# Altium schematic symbol library Resistor.SchLib: 1085 symbols (part 2 of 29)
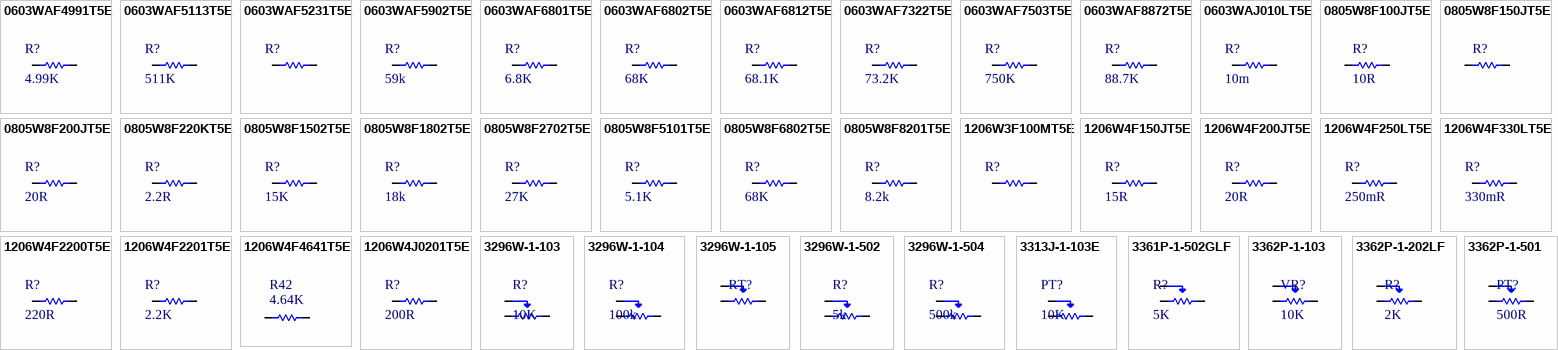
[diagram p28: symbols 0603WAF4991T5E to 3362P-1-501]

## 3296W-1-104
designator R?, comment 100k
Trimmer, Cermet, Rest 100 Kilohms, PCB, 25 Turns, Pwr-Rtg 0.5W, 3296 Series; Manufacturer: BOCHEN(Chengdu Guosheng Tech); Manufacturer Part Number: 3296W-1-104; Item Type: Potentiometer; LCSC Part Number: C330435; Value: 100k; ComponentLink1Description: LCSC; ComponentLink1URL: https://www.lcsc.com/product-detail/Variable-Resistors-Potentiometers_BOCHEN-Chengdu-Guosheng-Tech-3296W-1-104_C330435.html
footprint 3296W_
pins: 1 CCW, 2 Wiper, 3 CW

## 3296W-1-105
designator RT?
±10% 1MΩ Plugin Variable Resistors/Potentiometers ROHS; Manufacturer: BOCHEN; Manufacturer Part Number: 3296W-1-105; Package: Plugin; LCSC Part Number: C118944; Item Type: Potentiometers; ComponentLink1Description: LCSC; ComponentLink1URL: https://www.lcsc.com/product-detail/Variable-Resistors-Potentiometers_BOCHEN-Chengdu-Guosheng-Tech-3296W-1-105_C118944.html
footprint 3296W-1-105
pins: 1 CCW, 2 Wiper, 3 CW

## 3296W-1-502
designator R?, comment 5k
10% 5kΩ Plugin Potentiometers, Variable Resistors ROHS; Manufacturer: BOCHEN; Manufacturer Part Number: 3296W-1-502; LCSC Part Number: C118907; Item Type: Potentiometer; ComponentLink1Description: LCSC; ComponentLink1URL: https://www.lcsc.com/product-detail/Potentiometers-Variable-Resistors_BOCHEN-Chengdu-Guosheng-Tech-3296W-1-502_C118907.html
footprint 3296W-1-502
pins: 1 CCW, 2 Wiper, 3 CW

## 3296W-1-504
designator R?, comment 500k
Res Cermet Trimmer 500K Ohm 10% 1/2W 25(Elec)Turn; Manufacturer: BOCHEN(Chengdu Guosheng Tech); Manufacturer Part Number: 3296W-1-504; Item Type: Potentiometer; LCSC Part Number: C330437; ComponentLink1Description: LCSC; ComponentLink1URL: https://www.lcsc.com/product-detail/Variable-Resistors-Potentiometers_BOCHEN-Chengdu-Guosheng-Tech-3296W-1-504_C330437.html; Value: 500k
footprint 3296W_
pins: 1 CCW, 2 Wiper, 3 CW

## 3313J-1-103E
designator PT?, comment 10K
TRIMMER 10KOHM 0.125W J LEAD TOP; Manufacturer: Bourns; Manufacturer Part Number: 3313J-1-103E; Value: 10kR; Tolerance: 20%; Power Rating: 125mW; Number of Turns: 1; Temperature Coefficient: 100ppm/°C; Insulation Resistance: 100MR; Voltage Rating (DC): 500V; Item Type: Potentiometer; Supplier 1: Digi-Key; RoHS: Yes; Category: Variable Resistors and Potentiometers; Stock 1: 15653; Pricing 1: 1=1.83, 10=1.611, 25=1.4444, 50=1.3888, 100=1.3332, 250=1.27764, 500=1.05544 (USD); Mounting Technology: Surface Mount; Weight: 283mg; Color: Natural; Min Operating Temperature: -55°C; Max Operating Temperature: 125°C; Resistor Type: Cermet; Package Quantity: 1000; Packaging: Tape and Reel; Termination: J-Hook; Taper: Linear; Max Power Dissipation: 125mW; Type: Potentiometer; Series: Trimpot® 3313 - Sealed; Resistance Tolerance: 20%; Technology: CERMET; Length: 3.2mm; Width: 3.2mm; Height: 2.2mm; Depth: 3.5mm; Radiation Hardening: No; Reach SVHC Compliant: No; Military Standard: Not; Lead Free: Lead Free; RoHS Compliant: Yes; ComponentLink1URL: https://datasheet.ciiva.com/6197/1719390-6197392.pdf?src-supplier=Farnell; ComponentLink1Description: https://datasheet.ciiva.com/6197/1719390-6197392.pdf?src-supplier=Farnell; ComponentLink2URL: https://datasheet.ciiva.com/11831/0900766b80dbb89c-11831555.pdf?src-supplier=Rs; ComponentLink2Description: https://datasheet.ciiva.com/11831/0900766b80dbb89c-11831555.pdf?src-supplier=Rs; ComponentLink3URL: https://datasheet.ciiva.com/43573/1157501-43573718.pdf?src-supplier=Jameco; ComponentLink3Description: https://datasheet.ciiva.com/43573/1157501-43573718.pdf?src-supplier=Jameco; ComponentLink4URL: https://datasheet.ciiva.com/7953/1864507-7953225.pdf?src-supplier=Element14; ComponentLink4Description: https://datasheet.ciiva.com/7953/1864507-7953225.pdf?src-supplier=Element14; ComponentLink5URL: https://datasheet.ciiva.com/28659/1770668-28659191.pdf?src-supplier=Element14; ComponentLink5Description: https://datasheet.ciiva.com/28659/1770668-28659191.pdf?src-supplier=Element14; ComponentLink6URL: https://datasheet.ciiva.com/2156/3313-2156355.pdf?src-supplier=Digi-Key; ComponentLink6Description: https://datasheet.ciiva.com/2156/3313-2156355.pdf?src-supplier=Digi-Key; ComponentLink7URL: https://datasheet.ciiva.com/2156/3313-2156356.pdf?src-supplier=Digi-Key; ComponentLink7Description: https://datasheet.ciiva.com/2156/3313-2156356.pdf?src-supplier=Digi-Key; ComponentLink8URL: https://datasheet.ciiva.com/2156/3313-2156354.pdf?src-supplier=Digi-Key; ComponentLink8Description: https://datasheet.ciiva.com/2156/3313-2156354.pdf?src-supplier=Digi-Key; ComponentLink9URL: https://datasheet.ciiva.com/16715/70153423-16715693.pdf?src-supplier=Allied+Electronics; ComponentLink9Description: https://datasheet.ciiva.com/16715/70153423-16715693.pdf?src-supplier=Allied+Electronics; Supplier Part Number 1: 3313J-103ECT-ND; LCSC Part Number: C124616
footprint 3313J-1-103E
pins: 1 CCW, 2 Wiper, 3 CW

## 3361P-1-502GLF
designator R?, comment 5K
Resistor Cermet Trimmer 5K Ohm 10% 1/2W 1(Elec)/1(Mech)Turn 2.77mm Gull Wing SMD Embossed T/R; Manufacturer: Bourns; Manufacturer Part Number: 3361P-1-502GLF; Value: 5kR; Power Rating: 500mW; Voltage Rating: 300V; Number of Turns: 1; Temperature Coefficient: 100ppm/°C; Supplier: Digikey; Supplier Part Number: 3361P-502GLFCT-ND; RoHS: Yes; Category: Variable Resistors and Potentiometers; Stock: 12713; Pricing: 1=1.27, 10=1.121, 25=1.0088, 50=0.9716, 100=0.9342, 250=0.8782 (USD); Mounting Technology: Surface Mount; Weight: 0.567g; Min Operating Temperature: -55°C; Max Operating Temperature: 125°C; Tolerance: 10%; Resistor Type: Cermet; Packaging: Tape and Reel; Package Quantity: 1; Taper: Linear; Termination: Gull Wing; Max Power Dissipation: 500mW; Series: Trimpot® 3361 - Sealed; Resistance Tolerance: 10%; Technology: CERMET; Voltage Rating (DC): 300V; Length: 6.71mm; Width: 0.264inch; Height: 0.192inch; Depth: 8.53mm; Radiation Hardening: No; Reach SVHC Compliant: No; Military Standard: Not; RoHS Compliant: Yes; ComponentLink1URL: https://datasheet.ciiva.com/6197/1443095-6197504.pdf?src-supplier=Farnell; ComponentLink1Description: https://datasheet.ciiva.com/6197/1443095-6197504.pdf?src-supplier=Farnell; ComponentLink2URL: https://datasheet.ciiva.com/27056/2033666-27056369.pdf?src-supplier=Jameco; ComponentLink2Description: https://datasheet.ciiva.com/27056/2033666-27056369.pdf?src-supplier=Jameco; ComponentLink3URL: https://datasheet.ciiva.com/11833/0900766b80fe1d0c-11833209.pdf?src-supplier=Rs; ComponentLink3Description: https://datasheet.ciiva.com/11833/0900766b80fe1d0c-11833209.pdf?src-supplier=Rs; ComponentLink4URL: https://datasheet.ciiva.com/1477/1846252-1477777.pdf?src-supplier=Element14; ComponentLink4Description: https://datasheet.ciiva.com/1477/1846252-1477777.pdf?src-supplier=Element14; ComponentLink5URL: https://datasheet.ciiva.com/1477/1846252-1477776.pdf?src-supplier=Element14; ComponentLink5Description: https://datasheet.ciiva.com/1477/1846252-1477776.pdf?src-supplier=Element14; ComponentLink6URL: https://datasheet.ciiva.com/28666/1733537-28666333.pdf?src-supplier=Element14; ComponentLink6Description: https://datasheet.ciiva.com/28666/1733537-28666333.pdf?src-supplier=Element14; ComponentLink7URL: https://datasheet.ciiva.com/3266/3361-3266693.pdf?src-supplier=Avnet; ComponentLink7Description: https://datasheet.ciiva.com/3266/3361-3266693.pdf?src-supplier=Avnet; ComponentLink8URL: https://datasheet.ciiva.com/2156/3361-2156181.pdf?src-supplier=Digikey; ComponentLink8Description: https://datasheet.ciiva.com/2156/3361-2156181.pdf?src-supplier=Digikey; ComponentLink9URL: https://datasheet.ciiva.com/2156/3361-2156179.pdf?src-supplier=Digikey; ComponentLink9Description: https://datasheet.ciiva.com/2156/3361-2156179.pdf?src-supplier=Digikey; ComponentLink10URL: https://datasheet.ciiva.com/15225/getdatasheetpartid-162034-15225196.pdf?src-supplier=Verical; ComponentLink10Description: https://datasheet.ciiva.com/15225/getdatasheetpartid-162034-15225196.pdf?src-supplier=Verical; ComponentLink11URL: https://datasheet.ciiva.com/3266/3361-3266694.pdf?src-supplier=Avnet; ComponentLink11Description: https://datasheet.ciiva.com/3266/3361-3266694.pdf?src-supplier=Avnet; ComponentLink12URL: https://datasheet.ciiva.com/2156/3361-2156180.pdf?src-supplier=Digikey; ComponentLink12Description: https://datasheet.ciiva.com/2156/3361-2156180.pdf?src-supplier=Digikey; ComponentLink13URL: https://datasheet.ciiva.com/16716/70153632-16716878.pdf?src-supplier=Allied+Electronics; ComponentLink13Description: https://datasheet.ciiva.com/16716/70153632-16716878.pdf?src-supplier=Allied+Electronics
footprint 3361P-1-502GLF
pins: 1 CCW, 2 Wiper, 3 CW

## 3362P-1-103
designator VR?, comment 10K
TRIMMER 10K OHM 0.5W PC PIN TOP; Manufacturer: Bourns; Manufacturer Part Number: 3362P-1-103; Item Type: Potentiometer; Supplier: Mouser; LCSC Part Number: C118956; RoHS: No; Stock: 1436; Pricing: 1=1.97, 10=1.44, 50=1.44, 100=1.13, 1000=0.756, 10000=0.756 (USD); ComponentLink1URL: https://datasheet.ciiva.com/19466/1931499-19466806.pdf?src-supplier=Jameco; ComponentLink1Description: https://datasheet.ciiva.com/19466/1931499-19466806.pdf?src-supplier=Jameco; ComponentLink2URL: https://datasheet.ciiva.com/3266/3362-3266710.pdf?src-supplier=Avnet; ComponentLink2Description: https://datasheet.ciiva.com/3266/3362-3266710.pdf?src-supplier=Avnet; ComponentLink3URL: https://datasheet.ciiva.com/2161/3362-2161230.pdf?src-supplier=Digikey; ComponentLink3Description: https://datasheet.ciiva.com/2161/3362-2161230.pdf?src-supplier=Digikey
footprint 3362P-1-103
pins: 1 CCW, 2 Wiper, 3 CW

## 3362P-1-202LF
designator R?, comment 2K
TRIMMER 2K OHM 0.5W PC PIN TOP; Manufacturer: Bourns; Manufacturer Part Number: 3362P-1-202LF; Item Type: Potentiometer; Voltage Rating (AC): 300V; Tolerance: 10%; Value: 2kR; Power Rating: 500mW; Number of Turns: 1; Temperature Coefficient: 100ppm/°C; Supplier: Avnet; LCSC Part Number: C111654; RoHS: Yes; Stock: 2000; Pricing: 250=0.426, 260=0.417, 510=0.408, 1300=0.399, 2500=0.39, 13000=0.381, 25000=0.375 (USD); Mounting Technology: Through Hole,PCB; Color: 48Colour; Weight: 0.02oz; Min Operating Temperature: -55°C; Max Operating Temperature: 125°C; Voltage Rating: 300V; Packaging: Rail/Tube; Package Quantity: 50; Resistor Type: Cermet; Termination: Pin; Taper: Linear; Max Power Dissipation: 500mW; Series: Trimpot® 3362 - Sealed; Resistance Tolerance: 10%; Technology: CERMET; Length: 0.275inch; Width: 0.26inch; Height: 0.185inch; Depth: 6.99mm; Radiation Hardening: No; Lead Free: Lead Free; Reach SVHC Compliant: No; Military Standard: Not; RoHS Compliant: Yes; ComponentLink1URL: https://datasheet.ciiva.com/3890/41630408s7049825n1506-3890012.pdf?src-supplier=Arrow+Electronics; ComponentLink1Description: https://datasheet.ciiva.com/3890/41630408s7049825n1506-3890012.pdf?src-supplier=Arrow+Electronics; ComponentLink2URL: https://datasheet.ciiva.com/19482/1967467-19482206.pdf?src-supplier=Jameco; ComponentLink2Description: https://datasheet.ciiva.com/19482/1967467-19482206.pdf?src-supplier=Jameco; ComponentLink3URL: https://datasheet.ciiva.com/11830/0900766b8069ccf8-11830890.pdf?src-supplier=Rs; ComponentLink3Description: https://datasheet.ciiva.com/11830/0900766b8069ccf8-11830890.pdf?src-supplier=Rs; ComponentLink4URL: https://datasheet.ciiva.com/29122/447334-da-01-en-trimmer-tht3362p-1-202lf-2k-0-5w-29122266.pdf?src-supplier=Conrad; ComponentLink4Description: https://datasheet.ciiva.com/29122/447334-da-01-en-trimmer-tht3362p-1-202lf-2k-0-5w-29122266.pdf?src-supplier=Conrad; ComponentLink5URL: https://datasheet.ciiva.com/14108/mk3362-dat-e-14108841.pdf?src-supplier=Distrelec; ComponentLink5Description: https://datasheet.ciiva.com/14108/mk3362-dat-e-14108841.pdf?src-supplier=Distrelec; ComponentLink6URL: https://datasheet.ciiva.com/3266/3362-3266301.pdf?src-supplier=Avnet; ComponentLink6Description: https://datasheet.ciiva.com/3266/3362-3266301.pdf?src-supplier=Avnet; ComponentLink7URL: https://datasheet.ciiva.com/2156/3362-2156399.pdf?src-supplier=Digikey; ComponentLink7Description: https://datasheet.ciiva.com/2156/3362-2156399.pdf?src-supplier=Digikey; ComponentLink8URL: https://datasheet.ciiva.com/30125/3362-30125853.pdf?src-supplier=Onlinecomponents.com; ComponentLink8Description: https://datasheet.ciiva.com/30125/3362-30125853.pdf?src-supplier=Onlinecomponents.com; ComponentLink9URL: https://datasheet.ciiva.com/16715/70153603-16715070.pdf?src-supplier=Allied+Electronics; ComponentLink9Description: https://datasheet.ciiva.com/16715/70153603-16715070.pdf?src-supplier=Allied+Electronics; ComponentLink10URL: https://datasheet.ciiva.com/7953/1815116-7953048.pdf?src-supplier=Element14; ComponentLink10Description: https://datasheet.ciiva.com/7953/1815116-7953048.pdf?src-supplier=Element14
footprint 3362P-1-202LF
pins: 1 CCW, 2 Wiper, 3 CW

## 3362P-1-501
designator PT?, comment 500R
±10% 500Ω Plugin Variable Resistors/Potentiometers ROHS; Manufacturer: BOCHEN; Manufacturer Part Number: 3362P-1-501; Package: Plugin; LCSC Part Number: C118916; Item Type: Potentiometers; ComponentLink1Description: LCSC; ComponentLink1URL: https://www.lcsc.com/product-detail/Variable-Resistors-Potentiometers_BOCHEN-Chengdu-Guosheng-Tech-3362P-1-501_C118916.html
footprint 3362P-1-501
pins: 1 CCW, 2 Wiper, 3 CW

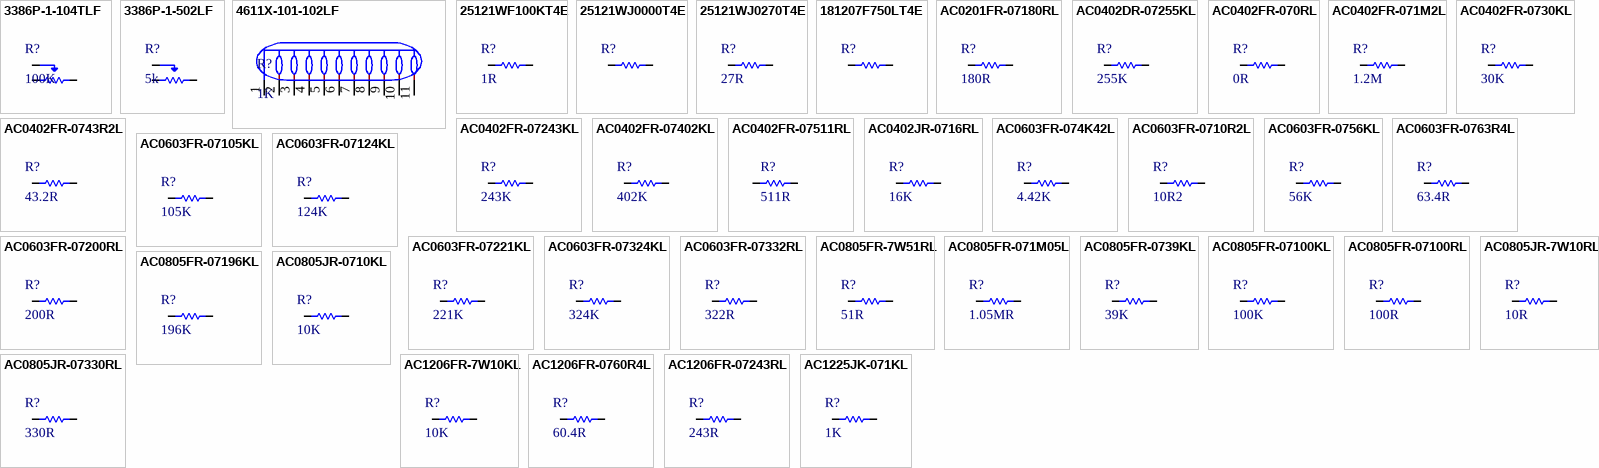
[diagram p3: symbols 3386P-1-104TLF to AC1225JK-071KL]

## 3386P-1-104TLF
designator R?, comment 100K
SMD Chip Resistor, 68 kOhm, ï¿½ 1%, 62.5 mW, 0402 [1005 Metric], Thick Film, General Purpose; Manufacturer: BOURNS; Manufacturer Part Number: 3386P-1-104TLF; Item Type: Potentiometer; Voltage Rating (AC): 300V; Power Rating: 63mW; Temperature Coefficient: 100ppm/°C; Voltage Rating: 50V; LCSC Part Number: C116303; ComponentLink1Description: LCSC; ComponentLink1URL: https://www.lcsc.com/product-detail/Potentiometers-Variable-Resistors_BOURNS-3386P-1-104TLF_C116303.html?s_z=n_%203386P-1-104; Value: 100K; Supplier: Digikey; Supplier Part Number: 3386P-502LF-ND; RoHS: Yes; Category: Variable Resistors and Potentiometers; Stock: 3184; Pricing: 1=1.61, 10=1.424, 25=1.2816, 50=1.2342, 100=1.1868, 250=1.11556, 500=0.9494, 1000=0.8782, 5000=0.72154 (USD); Case/Package: 0402; Case Code (Metric): 1005; Case Code (Imperial): 0402; Min Operating Temperature: -55°C; Max Operating Temperature: 155°C; Tolerance: 1%; Series: RC; Package Quantity: 1; Packaging: Tape and Reel; Resistor Type: Thick Film; Number of Terminations: 2; Termination: SMD/SMT; Max Power Dissipation: 63mW; Features: Moisture Resistant; Construction: Rectangular; Resistance Tolerance: 1%; Length: 0.039inch; Width: 0.02inch; Height: 0.016inch; Depth: 0.5mm; RoHS Compliant: Yes; Military Standard: Not; Reach SVHC Compliant: Unknown; Lead Free: 5697LeadFree; ComponentLink2URL: https://datasheet.ciiva.com/2553/pyu-r-int-thick-7-2553216.pdf?src-supplier=Digikey; ComponentLink2Description: https://datasheet.ciiva.com/2553/pyu-r-int-thick-7-2553216.pdf?src-supplier=Digikey; ComponentLink3URL: https://datasheet.ciiva.com/2553/pyu-r-int-thick-7-2553217.pdf?src-supplier=Digikey; ComponentLink3Description: https://datasheet.ciiva.com/2553/pyu-r-int-thick-7-2553217.pdf?src-supplier=Digikey; ComponentLink4URL: https://datasheet.ciiva.com/2553/pyu-r-int-thick-7-2553215.pdf?src-supplier=Digikey; ComponentLink4Description: https://datasheet.ciiva.com/2553/pyu-r-int-thick-7-2553215.pdf?src-supplier=Digikey; ComponentLink5URL: https://datasheet.ciiva.com/7850/1018594-7850072.pdf?src-supplier=Element14; ComponentLink5Description: https://datasheet.ciiva.com/7850/1018594-7850072.pdf?src-supplier=Element14; ComponentLink6URL: https://datasheet.ciiva.com/7850/1018594-7850073.pdf?src-supplier=Element14; ComponentLink6Description: https://datasheet.ciiva.com/7850/1018594-7850073.pdf?src-supplier=Element14; ComponentLink7URL: https://datasheet.ciiva.com/16781/pyu-rc0402-51-rohs-l-6-r-16781001.pdf?src-supplier=Future+Electronics; ComponentLink7Description: https://datasheet.ciiva.com/16781/pyu-rc0402-51-rohs-l-6-r-16781001.pdf?src-supplier=Future+Electronics
footprint 3386P-1-104TLF
pins: 1 CCW, 2 Wiper, 3 CW

## 3386P-1-502LF
designator R?, comment 5k
Cermet Not Linear VERTICAL Trimmer Potentiometer 卤10% 280deg 500mW 85C; Manufacturer: BOURNS; Manufacturer Part Number: 3386P-1-502LF; Voltage Rating (AC): 300V; LCSC Part Number: C116296; Item Type: Potentiometer; ComponentLink1Description: LCSC; ComponentLink1URL: https://www.lcsc.com/product-detail/Variable-Resistors-Potentiometers_BOURNS-3386P-1-502LF_C116296.html; Value: 5K; Supplier: Digikey; Supplier Part Number: 3386P-502LF-ND; RoHS: Yes; Category: Variable Resistors and Potentiometers; Stock: 3184; Pricing: 1=1.61, 10=1.424, 25=1.2816, 50=1.2342, 100=1.1868, 250=1.11556, 500=0.9494, 1000=0.8782, 5000=0.72154 (USD); ComponentLink2URL: https://datasheet.ciiva.com/27051/1158379-27051564.pdf?src-supplier=Jameco; ComponentLink2Description: https://datasheet.ciiva.com/27051/1158379-27051564.pdf?src-supplier=Jameco; ComponentLink3URL: https://datasheet.ciiva.com/11831/0900766b8069ccf9-11831043.pdf?src-supplier=Rs; ComponentLink3Description: https://datasheet.ciiva.com/11831/0900766b8069ccf9-11831043.pdf?src-supplier=Rs; ComponentLink4URL: https://datasheet.ciiva.com/29122/447392-da-01-en-trimmer-tht3386p-1-502lf-5k-0-5w-29122217.pdf?src-supplier=Conrad; ComponentLink4Description: https://datasheet.ciiva.com/29122/447392-da-01-en-trimmer-tht3386p-1-502lf-5k-0-5w-29122217.pdf?src-supplier=Conrad; ComponentLink5URL: https://datasheet.ciiva.com/2156/3386-2156421.pdf?src-supplier=Digikey; ComponentLink5Description: https://datasheet.ciiva.com/2156/3386-2156421.pdf?src-supplier=Digikey; ComponentLink6URL: https://datasheet.ciiva.com/14108/sa3386-dat-e-14108981.pdf?src-supplier=Distrelec; ComponentLink6Description: https://datasheet.ciiva.com/14108/sa3386-dat-e-14108981.pdf?src-supplier=Distrelec; ComponentLink7URL: https://datasheet.ciiva.com/5005/3386-21463-5005193.pdf?src-supplier=Mouser; ComponentLink7Description: https://datasheet.ciiva.com/5005/3386-21463-5005193.pdf?src-supplier=Mouser; ComponentLink8URL: https://datasheet.ciiva.com/7953/1815119-7953130.pdf?src-supplier=Element14; ComponentLink8Description: https://datasheet.ciiva.com/7953/1815119-7953130.pdf?src-supplier=Element14; ComponentLink9URL: https://datasheet.ciiva.com/16714/70153604-16714749.pdf?src-supplier=Allied+Electronics; ComponentLink9Description: https://datasheet.ciiva.com/16714/70153604-16714749.pdf?src-supplier=Allied+Electronics
footprint 3386P-1-502LF
pins: 1 CCW, 2 Wiper, 3 CW

## 4611X-101-102LF
designator R?, comment 1K
RES ARRAY 10 RES 1K OHM 11SIP; Manufacturer: Bourns; Manufacturer Part Number: 4611X-101-102LF; Item Type: Resistor Arrays; Circuit Type: Bussed; Lead Length: 3.3mm; Number of Circuits: 1; Number of Elements: 10; Power Dissipation: 1.38W; Power Per Element: 200mW; Value: 1kΩ; Temperature Coefficient: 100ppm/°C; Tolerance: 2%; Voltage Rating: 100V; Supplier: DigiKey; LCSC Part Number: C1357914; RoHS: Compliant; Stock: 900; Pricing: 1=0.54, 10=0.346, 25=0.294, 50=0.2614, 100=0.2335, 250=0.20288, 500=0.18372, 1000=0.16743, 5000=0.13843 (USD); Case/Package: SIP; China RoHS: Non-Compliant; Depth: 2.49mm; Height: 8.89mm; Lead Pitch: 2.54mm; Length: 27.8892mm; Lifecycle Status: Production; Max Operating Temperature: 125°C; Military Standard: Not; Min Operating Temperature: -55°C; Mounting Technology: Through Hole; Pins: 11; Number of Resistors: 10; Number of Terminals: 11; Packaging: Bulk; Power Rating: 1.38W; Radiation Hardening: No; REACH SVHC: Yes; Schedule B: 8533210075; Terminal Pitch: 2.54mm; Termination: Pin; Voltage Rating (DC): 100V; Width: 2.49mm; Working Voltage: 100V; ComponentLink1URL: https://datasheet.octopart.com:443/4611X-101-102LF-Bourns-datasheet-159442436.pdf?src-supplier=IHS; ComponentLink1Description: https://datasheet.octopart.com:443/4611X-101-102LF-Bourns-datasheet-159442436.pdf?src-supplier=IHS; ComponentLink2URL: https://datasheet.octopart.com:443/4611X-101-102LF-Bourns-datasheet-8636294.pdf?src-supplier=element14+APAC; ComponentLink2Description: https://datasheet.octopart.com:443/4611X-101-102LF-Bourns-datasheet-8636294.pdf?src-supplier=element14+APAC; ComponentLink3URL: http://sigma.octopart.com:80/conflict_mineral_statement/Bourns-company-36.pdf?src-supplier=Compliance+Statements; ComponentLink3Description: http://sigma.octopart.com:80/conflict_mineral_statement/Bourns-company-36.pdf?src-supplier=Compliance+Statements
footprint 4611X-101-102LF
pins: 1, 2, 3, 4, 5, 6, 7, 8, 9, 10, 11

## 25121WF100KT4E
designator R?, comment 1R
1W Thick Film Resistors ±1% ±400ppm/℃ 1Ω 2512 Chip Resistor - Surface Mount ROHS; Manufacturer: UNI-ROYAL; Manufacturer Part Number: 25121WF100KT4E; Package: 2512; LCSC Part Number: C11254; Item Type: Resistor; ComponentLink1Description: LCSC; ComponentLink1URL: https://www.lcsc.com/product-detail/Chip-Resistor-Surface-Mount_UNI-ROYAL-Uniroyal-Elec-25121WF100KT4E_C11254.html
footprint RES-2512
pins: 1, 2

## 25121WJ0000T4E
designator R?
1W Thick Film Resistor 200V ±5% ±800ppm/℃ 0Ω 2512 Chip Resistor - Surface Mount ROHS; Manufacturer: Royal Electronic Factory; Manufacturer Part Number: 25121WJ0000T4E; Value: 0R; Temperature Coefficient: 400ppm/°C; Supplier: Mouser; LCSC Part Number: C25469; RoHS: No; Item Type: Resistor; Stock: 12000; Pricing: 10000=0.019 (USD); ComponentLink1URL: https://datasheet.octopart.com/25121WJ0000T4E-Royal-Ohm-datasheet-165785611.pdf?src-supplier=TME; ComponentLink1Description: https://datasheet.octopart.com/25121WJ0000T4E-Royal-Ohm-datasheet-165785611.pdf?src-supplier=TME
footprint Res-2512
pins: 1, 2

## 25121WJ0270T4E
designator R?, comment 27R
1W Thick Film Resistors ±100ppm/℃ ±5% 27Ω 2512 Chip Resistor - Surface Mount ROHS; Manufacturer: UNI-ROYAL; Manufacturer Part Number: 25121WJ0270T4E; Package: 2512; LCSC Part Number: C25478; Item Type: Resistor; ComponentLink1Description: LCSC; ComponentLink1URL: https://www.lcsc.com/product-detail/Chip-Resistor-Surface-Mount_UNI-ROYAL-Uniroyal-Elec-25121WJ0270T4E_C25478.html
footprint RES-2512
pins: 1, 2

## 181207F750LT4E
designator R?
0.75W Thick Film Resistors 200V ±1% 750mΩ 1812 Chip Resistor - Surface Mount ROHS; Manufacturer: UNI-ROYAL(Uniroyal Elec); Manufacturer Part Number: 181207F750LT4E; Package: 1812; LCSC Part Number: C422051; Item Type: Resistor; ComponentLink1Description: LCSC; ComponentLink1URL: https://www.lcsc.com/product-detail/Chip-Resistor-Surface-Mount_UNI-ROYAL-Uniroyal-Elec-181207F750LT4E_C422051.html?s_z=n_0.75%20ohm
footprint Res 1812
pins: 1, 2

## AC0201FR-07180RL
designator R?, comment 180R
RES SMD 180 OHM 1% 1/20W 0201; Manufacturer: Yageo; Manufacturer Part Number: AC0201FR-07180RL; Max Power Dissipation: 50mW; Temperature Coefficient: 200ppm/°C; Item Type: Resistor; Supplier: Digi-Key; Supplier Part Number: YAG5164CT-ND; RoHS: Yes; Category: Chip SMD Resistors; Stock: 11641; Pricing: 1=0.1, 10=0.037, 50=0.024, 100=0.0203, 500=0.01412, 1000=0.0123, 5000=0.00915 (USD); Case/Package: 0201; Min Operating Temperature: -55°C; Max Operating Temperature: 155°C; Packaging: Tape and Reel; Value: 180R; Number of Terminations: 2; Tolerance: 1%; Features: Moisture Resistant,Automotive AEC-Q200; Series: AC; Length: 0.024inch; Width: 0.012inch; Height: 0.01inch; RoHS Compliant: Yes; ComponentLink1URL: http://www.yageo.com/NewPortal/yageodocoutput?fileName=/pdf/R-Chip/PYu-AC_51_RoHS_L_5.pdf&src-supplier=Digi-Key; ComponentLink1Description: http://www.yageo.com/NewPortal/yageodocoutput?fileName=/pdf/R-Chip/PYu-AC_51_RoHS_L_5.pdf&src-supplier=Digi-Key; ComponentLink2URL: http://www.yageo.com/NewPortal/yageodocoutput?fileName=/pdf/R-Chip/PYu-AC_51_RoHS_L_6.pdf&src-supplier=Digi-Key; ComponentLink2Description: http://www.yageo.com/NewPortal/yageodocoutput?fileName=/pdf/R-Chip/PYu-AC_51_RoHS_L_6.pdf&src-supplier=Digi-Key; LCSC Part Number: C226435
footprint Res-0201
pins: 1, 2

## AC0402DR-07255KL
designator R?, comment 255K
RES 255K OHM 0.5% 1/16W 0402; Manufacturer: Yageo; Manufacturer Part Number: AC0402DR-07255KL; Item Type: Resistors; Supplier: Mouser; LCSC Part Number: C226702; RoHS: Yes; Pricing: 1=0.1, 10=0.047, 50=0.047, 100=0.036, 1000=0.027, 10000=0.015 (USD); RoHS Compliant: Yes
footprint Res-0402
pins: 1, 2

## AC0402FR-070RL
designator R?, comment 0R
RESISTOR 0402 JUMPER ZERO OHM; Manufacturer: Yageo; Manufacturer Part Number: AC0402FR-070RL; Voltage Rating: 50V; Power Rating: 62.5mW; Tolerance: 1%; Temperature Coefficient: 200ppm/°C; Supplier: Digi-Key; Supplier Part Number: 13-AC0402FR-070RLDKR-ND; RoHS: Yes; Category: Chip SMD Resistors; Stock: 337140; Pricing: 1=0.1, 10=0.017, 25=0.0132, 50=0.01, 100=0.0071, 250=0.00568, 500=0.00454, 1000=0.00335, 5000=0.0024 (USD); Case/Package: 0402; Case Code (Imperial): 0402; Case Code (Metric): 1005; Min Operating Temperature: -55°C; Max Operating Temperature: 155°C; Value: 0R; Packaging: Tape and Reel; Termination: SMD/SMT; Series: AC; Height: 370um; ComponentLink1URL: https://datasheet.ciiva.com/12656/pyu-ac-51-rohs-l-2-12656734.pdf?src-supplier=Mouser; ComponentLink1Description: https://datasheet.ciiva.com/12656/pyu-ac-51-rohs-l-2-12656734.pdf?src-supplier=Mouser; LCSC Part Number: C226739; Item Type: Resistor; ComponentLink2Description: LCSC; ComponentLink2URL: https://www.lcsc.com/product-detail/Chip-Resistor-Surface-Mount_YAGEO-AC0402FR-070RL_C226739.html
footprint Res-0402
pins: 1, 2

## AC0402FR-071M2L
designator R?, comment 1.2M
RES SMD 1.2M OHM 1% 1/16W 0402; Manufacturer: Yageo; Manufacturer Part Number: AC0402FR-071M2L; Power Rating: 62.5mW; Value: 1.2MR; Voltage Rating: 50V; Max Power Dissipation: 63mW; Temperature Coefficient: 100ppm/°C; Item Type: Resistor; Supplier: Avnet; Supplier Part Number: AC0402FR-071M2L; RoHS: Yes; Category: Chip SMD Resistors; Stock: 1670000; Pricing: 10000=0.00115 (USD); Case/Package: 0402; Case Code (Imperial): 0402; Case Code (Metric): 1005; Min Operating Temperature: -55°C; Max Operating Temperature: 155°C; Packaging: Tape and Reel; Tolerance: 1%; Number of Terminations: 2; Termination: SMD/SMT; Features: Moisture Resistant,Automotive AEC-Q200; Series: AC; Length: 0.039inch; Width: 0.5mm; Height: 0.015inch; RoHS Compliant: Yes; ComponentLink1URL: http://www.mouser.com/ds/2/447/yageodocoutput-1111992.pdf?src-supplier=Mouser; ComponentLink1Description: http://www.mouser.com/ds/2/447/yageodocoutput-1111992.pdf?src-supplier=Mouser; ComponentLink2URL: http://www.yageo.com/NewPortal/yageodocoutput?fileName=/pdf/R-Chip/PYu-AC_51_RoHS_L_6.pdf&src-supplier=Digi-Key; ComponentLink2Description: http://www.yageo.com/NewPortal/yageodocoutput?fileName=/pdf/R-Chip/PYu-AC_51_RoHS_L_6.pdf&src-supplier=Digi-Key; LCSC Part Number: C226867
footprint Res-0402
pins: 1, 2

## AC0402FR-0730KL
designator R?, comment 30K
RES SMD 30K OHM 1% 1/16W 0402; Manufacturer: Yageo; Manufacturer Part Number: AC0402FR-0730KL; Item Type: Resistor; Power Rating: 62.5mW; Value: 30kR; Voltage Rating: 50V; Temperature Coefficient: 100ppm/°C; Max Power Dissipation: 63mW; Supplier: Future Electronics; Supplier Part Number: 2028482; RoHS: Yes; Stock: 2570000; Pricing: 10000=0.0021, 50000=0.0023, 150000=0.0019, 300000=0.0022, 500000=0.0018, 1000000=0.0021, 1500000=0.0018, 3000000=0.0019, 5000000=0.0016 (USD); Case/Package: 0402; Case Code (Imperial): 0402; Case Code (Metric): 1005; Weight: 2.3E-05oz; Min Operating Temperature: -55°C; Max Operating Temperature: 155°C; Tolerance: 1%; Packaging: Tape and Reel; Termination: SMD/SMT; Number of Terminations: 2; Features: Moisture Resistant,Automotive AEC-Q200; Series: AC; Length: 0.039inch; Width: 0.5mm; Height: 0.015inch; Lead Free: Lead Free; RoHS Compliant: Yes; ComponentLink1URL: http://www.mouser.com/ds/2/447/yageodocoutput-1111992.pdf?src-supplier=Mouser; ComponentLink1Description: http://www.mouser.com/ds/2/447/yageodocoutput-1111992.pdf?src-supplier=Mouser; ComponentLink2URL: https://datasheet.octopart.com/AC0402FR-0730KL-Yageo-datasheet-166720450.pdf?src-supplier=Future+Electronics; ComponentLink2Description: https://datasheet.octopart.com/AC0402FR-0730KL-Yageo-datasheet-166720450.pdf?src-supplier=Future+Electronics; ComponentLink3URL: http://www.yageo.com/documents/recent/PYu-AC_51_RoHS_L_2_revised.pdf?src-supplier=Future+Electronics; ComponentLink3Description: http://www.yageo.com/documents/recent/PYu-AC_51_RoHS_L_2_revised.pdf?src-supplier=Future+Electronics; ComponentLink4URL: http://www.yageo.com/NewPortal/yageodocoutput?fileName=/pdf/R-Chip/PYu-AC_51_RoHS_L_6.pdf&src-supplier=Digikey; ComponentLink4Description: http://www.yageo.com/NewPortal/yageodocoutput?fileName=/pdf/R-Chip/PYu-AC_51_RoHS_L_6.pdf&src-supplier=Digikey
footprint Res-0402
pins: 1, 2

## AC0402FR-0743R2L
designator R?, comment 43.2R
RES SMD 43.2 OHM 1% 1/16W 0402; Manufacturer: Yageo; Manufacturer Part Number: AC0402FR-0743R2L; Voltage Rating: 50V; Power Rating: 62.5mW; Temperature Coefficient: 100ppm/°C; Max Power Dissipation: 63mW; Supplier: Arrow Electronics; LCSC Part Number: C227082; RoHS: Yes; Category: Resistor; Stock: 130000; Pricing: 10000=0.0024, 20000=0.0014 (USD); Case/Package: 0402; Case Code (Imperial): 0402; Case Code (Metric): 1005; Weight: 2.3E-05oz; Min Operating Temperature: -55°C; Max Operating Temperature: 155°C; Value: 43.2R; Tolerance: 1%; Packaging: Tape and Reel; Termination: SMD/SMT; Number of Terminations: 2; Features: Moisture Resistant,Automotive AEC-Q200; Series: AC; Length: 0.039inch; Width: 0.5mm; Height: 0.015inch; RoHS Compliant: Yes; ComponentLink1URL: http://www.mouser.com/ds/2/447/yageodocoutput-1111992.pdf?src-supplier=Mouser; ComponentLink1Description: http://www.mouser.com/ds/2/447/yageodocoutput-1111992.pdf?src-supplier=Mouser; ComponentLink2URL: http://www.yageo.com/NewPortal/yageodocoutput?fileName=/pdf/R-Chip/PYu-AC_51_RoHS_L_6.pdf&src-supplier=Digikey; ComponentLink2Description: http://www.yageo.com/NewPortal/yageodocoutput?fileName=/pdf/R-Chip/PYu-AC_51_RoHS_L_6.pdf&src-supplier=Digikey
footprint Res-0402
pins: 1, 2

## AC0402FR-07243KL
designator R?, comment 243K
RES SMD 243K OHM 1% 1/16W 0402; Manufacturer: Yageo; Manufacturer Part Number: AC0402FR-07243KL; Item Type: Resistors; Value: 243kR; Max Power Dissipation: 63mW; Temperature Coefficient: 100ppm/°C; Voltage Rating: 50V; Supplier: Future Electronics; Supplier Part Number: 4132011; RoHS: Yes; Stock: 80000; Pricing: 10000=0.0017, 50000=0.0016, 300000=0.0015, 1000000=0.0014, 3000000=0.0013 (USD); Case/Package: 0402; Case Code (Imperial): 0402; Case Code (Metric): 1005; Min Operating Temperature: -55°C; Max Operating Temperature: 155°C; Packaging: Tape and Reel; Number of Terminations: 2; Tolerance: 1%; Features: Moisture Resistant,Automotive AEC-Q200; Series: AC; Length: 0.039inch; Width: 0.02inch; Height: 0.015inch; Ratings: AEC-Q200; RoHS Compliant: Yes; ComponentLink1URL: https://www.mouser.com/ds/2/447/yageodocoutput-1111992.pdf?src-supplier=Mouser; ComponentLink1Description: https://www.mouser.com/ds/2/447/yageodocoutput-1111992.pdf?src-supplier=Mouser; ComponentLink2URL: https://www.yageo.com/upload/media/product/productsearch/datasheet/rchip/PYu-AC_51_RoHS_L_7.pdf?src-supplier=Digikey; ComponentLink2Description: https://www.yageo.com/upload/media/product/productsearch/datasheet/rchip/PYu-AC_51_RoHS_L_7.pdf?src-supplier=Digikey; ComponentLink3URL: http://www.yageo.com/NewPortal/yageodocoutput?fileName=/pdf/R-Chip/PYu-AC_51_RoHS_L_6.pdf&src-supplier=Digikey; ComponentLink3Description: http://www.yageo.com/NewPortal/yageodocoutput?fileName=/pdf/R-Chip/PYu-AC_51_RoHS_L_6.pdf&src-supplier=Digikey; LCSC Part Number: C226366
footprint Res-0402
pins: 1, 2

## AC0402FR-07402KL
designator R?, comment 402K
RES SMD 402K OHM 1% 1/16W 0402; Manufacturer: Yageo; Manufacturer Part Number: AC0402FR-07402KL; Item Type: Resistors; Power Rating: 62.5mW; Value: 402kR; Voltage Rating: 50V; Temperature Coefficient: 100ppm/°C; Max Power Dissipation: 63mW; Supplier: Digikey; LCSC Part Number: C227065; RoHS: Yes; Stock: 23022; Pricing: 1=0.1, 10=0.012, 50=0.0096, 100=0.0071, 500=0.00612, 1000=0.0051, 5000=0.00408 (USD); Case/Package: 0402; Case Code (Imperial): 0402; Case Code (Metric): 1005; Min Operating Temperature: -55°C; Max Operating Temperature: 155°C; Packaging: Tape and Reel; Tolerance: 1%; Termination: SMD/SMT; Number of Terminations: 2; Features: Moisture Resistant,Automotive AEC-Q200; Series: AC; Length: 0.039inch; Width: 0.5mm; Height: 0.015inch; RoHS Compliant: Yes; ComponentLink1URL: http://www.mouser.com/ds/2/447/yageodocoutput-1111992.pdf?src-supplier=Mouser; ComponentLink1Description: http://www.mouser.com/ds/2/447/yageodocoutput-1111992.pdf?src-supplier=Mouser; ComponentLink2URL: http://www.yageo.com/NewPortal/yageodocoutput?fileName=/pdf/R-Chip/PYu-AC_51_RoHS_L_6.pdf&src-supplier=Digikey; ComponentLink2Description: http://www.yageo.com/NewPortal/yageodocoutput?fileName=/pdf/R-Chip/PYu-AC_51_RoHS_L_6.pdf&src-supplier=Digikey
footprint Res-0402
pins: 1, 2

## AC0402FR-07511RL
designator R?, comment 511R
RES SMD 511 OHM 1% 1/16W 0402; Manufacturer: Yageo; Manufacturer Part Number: AC0402FR-07511RL; Item Type: Resistor; Power Rating: 62.5mW; Voltage Rating: 50V; Temperature Coefficient: 100ppm/°C; Max Power Dissipation: 63mW; Supplier: Digikey; LCSC Part Number: C227124; RoHS: Yes; Pricing: 10000=0.00343 (USD); Case/Package: 0402; Case Code (Imperial): 0402; Case Code (Metric): 1005; Weight: 2.3E-05oz; Min Operating Temperature: -55°C; Max Operating Temperature: 155°C; Tolerance: 1%; Value: 511R; Packaging: Tape and Reel; Termination: SMD/SMT; Number of Terminations: 2; Features: Moisture Resistant,Automotive AEC-Q200; Series: AC; Length: 0.039inch; Width: 0.5mm; Height: 0.015inch; RoHS Compliant: Yes; ComponentLink1URL: http://www.mouser.com/ds/2/447/yageodocoutput-1111992.pdf?src-supplier=Mouser; ComponentLink1Description: http://www.mouser.com/ds/2/447/yageodocoutput-1111992.pdf?src-supplier=Mouser; ComponentLink2URL: http://www.yageo.com/NewPortal/yageodocoutput?fileName=/pdf/R-Chip/PYu-AC_51_RoHS_L_6.pdf&src-supplier=Digikey; ComponentLink2Description: http://www.yageo.com/NewPortal/yageodocoutput?fileName=/pdf/R-Chip/PYu-AC_51_RoHS_L_6.pdf&src-supplier=Digikey
footprint Res-0402
pins: 1, 2

## AC0402JR-0716RL
designator R?, comment 16K
RES SMD 16 OHM 5% 1/16W 0402; Manufacturer: Yageo; Manufacturer Part Number: AC0402JR-0716RL; Value: 16R; Max Power Dissipation: 63mW; Temperature Coefficient: 100ppm/°C; Voltage Rating: 50V; Item Type: Resistor; Supplier: Digikey; Supplier Part Number: AC0402JR-0716RL-ND; RoHS: Yes; Category: Chip SMD Resistors; Pricing: 10000=0.00299 (USD); Case/Package: 0402; Min Operating Temperature: -55°C; Max Operating Temperature: 155°C; Packaging: Tape and Reel; Number of Terminations: 2; Tolerance: 5%; Features: Moisture Resistant,Automotive AEC-Q200; Series: AC; Length: 0.039inch; Width: 0.02inch; Height: 0.015inch; RoHS Compliant: Yes; ComponentLink1URL: http://www.yageo.com/NewPortal/yageodocoutput?fileName=/pdf/R-Chip/PYu-AC_51_RoHS_L_6.pdf&src-supplier=Digikey; ComponentLink1Description: http://www.yageo.com/NewPortal/yageodocoutput?fileName=/pdf/R-Chip/PYu-AC_51_RoHS_L_6.pdf&src-supplier=Digikey; LCSC Part Number: C227309
footprint Res-0402
pins: 1, 2

## AC0603FR-074K42L
designator R?, comment 4.42K
RES SMD 4.42K OHM 1% 1/10W 0603; Manufacturer: Yageo; Manufacturer Part Number: AC0603FR-074K42L; Item Type: Resistor; Supplier: Digikey; LCSC Part Number: C227930; RoHS: Yes; Stock: 13555; Pricing: 1=0.1, 10=0.021, 50=0.013, 100=0.0108, 500=0.00734, 1000=0.00633 (USD); ComponentLink1URL: https://datasheet.ciiva.com/12576/pyu-ac-51-rohs-l-2-12576475.pdf?src-supplier=Mouser; ComponentLink1Description: https://datasheet.ciiva.com/12576/pyu-ac-51-rohs-l-2-12576475.pdf?src-supplier=Mouser
footprint Res-0603
pins: 1, 2

## AC0603FR-0710R2L
designator R?, comment 10R2
100mW 10.2Ω 75V Thick Film Resistor ±100ppm/℃ ±1% 0603; Manufacturer: Yageo; Manufacturer Part Number: AC0603FR-0710R2L; LCSC Part Number: C227548; RoHS: Yes; Item Type: Resistor; ComponentLink1URL: https://datasheet.ciiva.com/12576/pyu-ac-51-rohs-l-2-12576475.pdf?src-supplier=Mouser; ComponentLink1Description: https://www.lcsc.com/datasheet/C227548.pdf
footprint Res-0603
pins: 1, 2

## AC0603FR-0756KL
designator R?, comment 56K
RES SMD 56K OHM 1% 1/10W 0603; Manufacturer: Yageo; Manufacturer Part Number: AC0603FR-0756KL; Item Type: Resistor; Supplier: Future Electronics; Supplier Part Number: 4073924; RoHS: Yes; Category: Chip SMD Resistors; Stock: 100000; Pricing: 5000=0.0016, 25000=0.0015, 150000=0.0014, 500000=0.0014, 1500000=0.0013 (USD); ComponentLink1URL: http://www.mouser.com/ds/2/447/yageodocoutput-1111992.pdf?src-supplier=Mouser; ComponentLink1Description: http://www.mouser.com/ds/2/447/yageodocoutput-1111992.pdf?src-supplier=Mouser; ComponentLink2URL: http://www.yageo.com/NewPortal/yageodocoutput?fileName=/pdf/R-Chip/PYu-AC_51_RoHS_L_6.pdf&src-supplier=Digi-Key; ComponentLink2Description: http://www.yageo.com/NewPortal/yageodocoutput?fileName=/pdf/R-Chip/PYu-AC_51_RoHS_L_6.pdf&src-supplier=Digi-Key; ComponentLink3URL: https://datasheet.octopart.com/AC0603FR-0756KL-Yageo-datasheet-151884373.pdf?src-supplier=Future+Electronics; ComponentLink3Description: https://datasheet.octopart.com/AC0603FR-0756KL-Yageo-datasheet-151884373.pdf?src-supplier=Future+Electronics; LCSC Part Number: C144647
footprint Res-0603
pins: 1, 2

## AC0603FR-0763R4L
designator R?, comment 63.4R
RES SMD 63.4 OHM 1% 1/10W 0603; Manufacturer: Yageo; Manufacturer Part Number: AC0603FR-0763R4L; Item Type: Resistor; Power Rating: 100mW; Voltage Rating: 50V; Temperature Coefficient: 100ppm/°C; Supplier: Digikey; LCSC Part Number: C228004; RoHS: Yes; Stock: 4788; Pricing: 1=0.1, 10=0.021, 50=0.013, 100=0.0108, 500=0.00734, 1000=0.00633 (USD); Case/Package: 0603; Case Code (Imperial): 0603; Case Code (Metric): 1608; Weight: 7.1E-05oz; Min Operating Temperature: -55°C; Max Operating Temperature: 155°C; Tolerance: 1%; Value: 63.4R; Packaging: Tape and Reel; Termination: SMD/SMT; Number of Terminations: 2; Max Power Dissipation: 100mW; Features: Moisture Resistant,Automotive AEC-Q200; Series: AC; Length: 0.063inch; Width: 0.8mm; Height: 0.022inch; RoHS Compliant: Yes; ComponentLink1URL: https://datasheet.ciiva.com/12576/pyu-ac-51-rohs-l-2-12576614.pdf?src-supplier=Mouser; ComponentLink1Description: https://datasheet.ciiva.com/12576/pyu-ac-51-rohs-l-2-12576614.pdf?src-supplier=Mouser
footprint Res-0603
pins: 1, 2

## AC0603FR-07105KL
designator R?, comment 105K
RES SMD 105K OHM 1% 1/10W 0603; Manufacturer: Yageo; Manufacturer Part Number: AC0603FR-07105KL; Item Type: Resistors; Value: 105kR; Max Power Dissipation: 100mW; Temperature Coefficient: 100ppm/°C; Voltage Rating: 75V; Supplier: Digikey; LCSC Part Number: C227540; RoHS: Yes; Stock: 173428; Pricing: 1=0.1, 10=0.013, 100=0.0107, 500=0.00816, 1000=0.00612 (USD); Case/Package: 0603; Min Operating Temperature: -55°C; Max Operating Temperature: 155°C; Packaging: Tape and Reel; Number of Terminations: 2; Tolerance: 1%; Features: Moisture Resistant,Automotive AEC-Q200; Series: AC; Length: 0.063inch; Width: 0.031inch; Height: 0.022inch; RoHS Compliant: Yes; ComponentLink1URL: http://www.yageo.com/NewPortal/yageodocoutput?fileName=/pdf/R-Chip/PYu-AC_51_RoHS_L_6.pdf&src-supplier=Digikey; ComponentLink1Description: http://www.yageo.com/NewPortal/yageodocoutput?fileName=/pdf/R-Chip/PYu-AC_51_RoHS_L_6.pdf&src-supplier=Digikey
footprint Res-0603
pins: 1, 2

## AC0603FR-07124KL
designator R?, comment 124K
RES SMD 124K OHM 1% 1/10W 0603; Manufacturer: Yageo; Manufacturer Part Number: AC0603FR-07124KL; Item Type: Resistor; Supplier: Mouser; Supplier Part Number: 603-AC0603FR-07124KL; RoHS: Yes; Category: Chip SMD Resistors; Stock: 7297; Pricing: 1=0.1, 10=0.013, 50=0.013, 100=0.007, 1000=0.006, 10000=0.003 (USD); ComponentLink1URL: http://www.mouser.com/ds/2/447/yageodocoutput-1111992.pdf?src-supplier=Mouser; ComponentLink1Description: http://www.mouser.com/ds/2/447/yageodocoutput-1111992.pdf?src-supplier=Mouser; ComponentLink2URL: http://www.yageo.com/NewPortal/yageodocoutput?fileName=/pdf/R-Chip/PYu-AC_51_RoHS_L_6.pdf&src-supplier=Digi-Key; ComponentLink2Description: http://www.yageo.com/NewPortal/yageodocoutput?fileName=/pdf/R-Chip/PYu-AC_51_RoHS_L_6.pdf&src-supplier=Digi-Key; LCSC Part Number: C227568
footprint Res-0603
pins: 1, 2

## AC0603FR-07200RL
designator R?, comment 200R
RES SMD 200 OHM 1% 1/10W 0603; Manufacturer: Yageo; Manufacturer Part Number: AC0603FR-07200RL; Voltage Rating: 75V; Item Type: Resistor; Supplier: Avnet; Supplier Part Number: AC0603FR-07200RL; RoHS: Yes; Category: Chip SMD Resistors; Stock: 45000; Pricing: 5000=0.00174, 10000=0.00171, 20000=0.00166 (USD); ComponentLink1URL: https://datasheet.octopart.com/AC0603FR-07200RL-Yageo-datasheet-151884373.pdf?src-supplier=Future+Electronics; ComponentLink1Description: https://datasheet.octopart.com/AC0603FR-07200RL-Yageo-datasheet-151884373.pdf?src-supplier=Future+Electronics; ComponentLink2URL: http://www.yageo.com/NewPortal/yageodocoutput?fileName=/pdf/R-Chip/PYu-AC_51_RoHS_L_6.pdf&src-supplier=Digi-Key; ComponentLink2Description: http://www.yageo.com/NewPortal/yageodocoutput?fileName=/pdf/R-Chip/PYu-AC_51_RoHS_L_6.pdf&src-supplier=Digi-Key; LCSC Part Number: C125935
footprint Res-0603
pins: 1, 2

## AC0603FR-07221KL
designator R?, comment 221K
RES SMD 221K OHM 1% 1/10W 0603; Manufacturer: Yageo; Manufacturer Part Number: AC0603FR-07221KL; Item Type: Resistor; Supplier: Avnet; Supplier Part Number: AC0603FR-07221KL; RoHS: Yes; Category: Chip SMD Resistors; Stock: 1875000; Pricing: 5000=0.00174, 10000=0.00171, 20000=0.00166 (USD); ComponentLink1URL: http://www.mouser.com/ds/2/447/yageodocoutput-1111992.pdf?src-supplier=Mouser; ComponentLink1Description: http://www.mouser.com/ds/2/447/yageodocoutput-1111992.pdf?src-supplier=Mouser; ComponentLink2URL: https://datasheet.octopart.com/AC0603FR-07221KL-Yageo-datasheet-151884373.pdf?src-supplier=Future+Electronics; ComponentLink2Description: https://datasheet.octopart.com/AC0603FR-07221KL-Yageo-datasheet-151884373.pdf?src-supplier=Future+Electronics; ComponentLink3URL: http://www.yageo.com/documents/recent/PYu-AC_51_RoHS_L_2.pdf?src-supplier=Future+Electronics; ComponentLink3Description: http://www.yageo.com/documents/recent/PYu-AC_51_RoHS_L_2.pdf?src-supplier=Future+Electronics; ComponentLink4URL: http://www.yageo.com/NewPortal/yageodocoutput?fileName=/pdf/R-Chip/PYu-AC_51_RoHS_L_6.pdf&src-supplier=Digi-Key; ComponentLink4Description: http://www.yageo.com/NewPortal/yageodocoutput?fileName=/pdf/R-Chip/PYu-AC_51_RoHS_L_6.pdf&src-supplier=Digi-Key; LCSC Part Number: C227712
footprint Res-0603
pins: 1, 2

## AC0603FR-07324KL
designator R?, comment 324K
RES SMD 324K OHM 1% 1/10W 0603; Manufacturer: Yageo; Manufacturer Part Number: AC0603FR-07324KL; Item Type: Resistors; Value: 324kR; Power Rating: 100mW; Voltage Rating: 50V; Temperature Coefficient: 100ppm/°C; Supplier: Digikey; LCSC Part Number: C227818; RoHS: Yes; Stock: 5000; Pricing: 1=0.1, 10=0.021, 50=0.013, 100=0.0108, 500=0.00734, 1000=0.00633 (USD); Case/Package: 0603; Case Code (Metric): 1608; Case Code (Imperial): 0603; Min Operating Temperature: -55°C; Max Operating Temperature: 155°C; Package Quantity: 1; Tolerance: 1%; Packaging: Tape and Reel; Number of Terminations: 2; Termination: SMD/SMT; Max Power Dissipation: 100mW; Features: Moisture Resistant,Automotive AEC-Q200,Anti-Sulfur; Series: AC; Length: 0.063inch; Width: 0.031inch; Height: 0.022inch; RoHS Compliant: Yes; ComponentLink1URL: http://www.mouser.com/ds/2/447/yageodocoutput-1111992.pdf?src-supplier=Mouser; ComponentLink1Description: http://www.mouser.com/ds/2/447/yageodocoutput-1111992.pdf?src-supplier=Mouser; ComponentLink2URL: https://www.yageo.com/upload/media/product/productsearch/datasheet/rchip/PYu-AC_51_RoHS_L_7.pdf?src-supplier=Digikey; ComponentLink2Description: https://www.yageo.com/upload/media/product/productsearch/datasheet/rchip/PYu-AC_51_RoHS_L_7.pdf?src-supplier=Digikey
footprint Res-0603
pins: 1, 2

## AC0603FR-07332RL
designator R?, comment 322R
RES SMD 332 OHM 1% 1/10W 0603; Manufacturer: Yageo; Manufacturer Part Number: AC0603FR-07332RL; Item Type: Resistors; Supplier: Digikey; LCSC Part Number: C227823; RoHS: Yes; Stock: 12045; Pricing: 1=0.1, 10=0.013, 100=0.0107, 500=0.00816, 1000=0.00612 (USD); ComponentLink1URL: https://datasheet.ciiva.com/12576/pyu-ac-51-rohs-l-2-12576399.pdf?src-supplier=Mouser; ComponentLink1Description: https://datasheet.ciiva.com/12576/pyu-ac-51-rohs-l-2-12576399.pdf?src-supplier=Mouser
footprint Res-0603
pins: 1, 2

## AC0805FR-7W51RL
designator R?, comment 51R
RES 51 OHM 1% 1/4W 0805; Manufacturer: Yageo; Manufacturer Part Number: AC0805FR-7W51RL; Item Type: Resistor; Supplier: Digi-Key; Supplier Part Number: 13-AC0805FR-7W51RLTR-ND; RoHS: Yes; Category: Chip SMD Resistors; Pricing: 5000=0.01178 (USD); LCSC Part Number: C727996
footprint RES-0805 (SMD 0805)
pins: 1, 2

## AC0805FR-071M05L
designator R?, comment 1.05MR
RES 1.05 MOHM 1% 1/8W 0805; Manufacturer: Yageo; Manufacturer Part Number: AC0805FR-071M05L; Supplier: Digikey; LCSC Part Number: C228592; RoHS: Yes; Category: Chip SMD Resistors; Pricing: 5000=0.00714 (USD); RoHS Compliant: Yes
footprint RES-0805 (SMD 0805)
pins: 1, 2

## AC0805FR-0739KL
designator R?, comment 39K
RES SMD 39K OHM 1% 1/8W 0805; Manufacturer: Yageo; Manufacturer Part Number: AC0805FR-0739KL; Item Type: Resistors; Supplier: Arrow Electronics; LCSC Part Number: C228786; RoHS: Yes; Stock: 85000; Pricing: 5000=0.0055, 25000=0.0046, 50000=0.0037 (USD); ComponentLink1URL: http://www.mouser.com/ds/2/447/yageodocoutput-1111992.pdf?src-supplier=Mouser; ComponentLink1Description: http://www.mouser.com/ds/2/447/yageodocoutput-1111992.pdf?src-supplier=Mouser; ComponentLink2URL: https://datasheet.octopart.com/AC0805FR-0739KL-Yageo-datasheet-164768995.pdf?src-supplier=Future+Electronics; ComponentLink2Description: https://datasheet.octopart.com/AC0805FR-0739KL-Yageo-datasheet-164768995.pdf?src-supplier=Future+Electronics; ComponentLink3URL: https://www.yageo.com/upload/media/product/productsearch/datasheet/rchip/PYu-AC_51_RoHS_L_7.pdf?src-supplier=Digikey; ComponentLink3Description: https://www.yageo.com/upload/media/product/productsearch/datasheet/rchip/PYu-AC_51_RoHS_L_7.pdf?src-supplier=Digikey; ComponentLink4URL: http://www.yageo.com/NewPortal/yageodocoutput?fileName=/pdf/R-Chip/PYu-AC_51_RoHS_L_6.pdf&src-supplier=Digikey; ComponentLink4Description: http://www.yageo.com/NewPortal/yageodocoutput?fileName=/pdf/R-Chip/PYu-AC_51_RoHS_L_6.pdf&src-supplier=Digikey
footprint RES-0805 (SMD 0805)
pins: 1, 2

## AC0805FR-07100KL
designator R?, comment 100K
Res Thick Film 0805 100K Ohm 1% 1/8W ±100ppm/°C Molded SMD SMD Paper T/R; Manufacturer: Yageo; Manufacturer Part Number: AC0805FR-07100KL; Value: 100kR; Power Rating: 125mW; Voltage Rating: 150V; Item Type: Resistor; Supplier: Digikey; Supplier Part Number: YAG3688CT-ND; RoHS: Yes; Category: Chip SMD Resistors; Stock: 68381; Pricing: 1=0.1, 10=0.031, 50=0.0198, 100=0.0166, 500=0.01152, 1000=0.00997 (USD); Case/Package: 0805; Contact Plating: Tin,Matte; Case Code (Imperial): 0805; Case Code (Metric): 2012; Min Operating Temperature: -55°C; Max Operating Temperature: 155°C; Tolerance: 1%; Temperature Coefficient: 100ppm/°C; Packaging: Tape and Reel; Number of Terminations: 2; Termination: SMD/SMT; Max Power Dissipation: 125mW; Features: Moisture Resistant,Automotive AEC-Q200; Series: AC; Length: 0.079inch; Width: 0.049inch; Height: 0.024inch; Lead Free: Lead Free; RoHS Compliant: Yes; ComponentLink1URL: http://www.mouser.com/ds/2/447/yageodocoutput-1111992.pdf?src-supplier=Mouser; ComponentLink1Description: http://www.mouser.com/ds/2/447/yageodocoutput-1111992.pdf?src-supplier=Mouser; ComponentLink2URL: http://www.yageo.com/NewPortal/yageodocoutput?fileName=/pdf/R-Chip/PYu-AC_51_RoHS_L_6.pdf&src-supplier=Digikey; ComponentLink2Description: http://www.yageo.com/NewPortal/yageodocoutput?fileName=/pdf/R-Chip/PYu-AC_51_RoHS_L_6.pdf&src-supplier=Digikey; ComponentLink3URL: https://datasheet.octopart.com/AC0805FR-07100KL-Yageo-datasheet-151884373.pdf?src-supplier=Future+Electronics; ComponentLink3Description: https://datasheet.octopart.com/AC0805FR-07100KL-Yageo-datasheet-151884373.pdf?src-supplier=Future+Electronics; ComponentLink4URL: http://www.yageo.com/documents/recent/PYu-AC_51_RoHS_L_2_revised.pdf?src-supplier=Future+Electronics; ComponentLink4Description: http://www.yageo.com/documents/recent/PYu-AC_51_RoHS_L_2_revised.pdf?src-supplier=Future+Electronics; Package: 0805; LCSC Part Number: C144587
footprint RES-0805 (SMD 0805)
pins: 1, 2

## AC0805FR-07100RL
designator R?, comment 100R
RES SMD 100 OHM 1% 1/8W 0805; Manufacturer: Yageo; Manufacturer Part Number: AC0805FR-07100RL; Item Type: Resistor; Supplier: Future Electronics; Supplier Part Number: 6087312; RoHS: Yes; Category: Chip SMD Resistors; Stock: 70000; Pricing: 5000=0.0032, 25000=0.003, 125000=0.0028, 375000=0.0027, 1000000=0.0025 (USD); ComponentLink1URL: https://datasheet.ciiva.com/12656/pyu-ac-51-rohs-l-2-12656967.pdf?src-supplier=Mouser; ComponentLink1Description: https://datasheet.ciiva.com/12656/pyu-ac-51-rohs-l-2-12656967.pdf?src-supplier=Mouser; LCSC Part Number: C138274
footprint RES-0805 (SMD 0805)
pins: 1, 2